# EAGLE library part COM-16273 (library COM-16273)
Joystick, 2 - Axis Analog (Resistive) Output Source: Datasheet <https://cdn.sparkfun.com/assets/f/e/3/8/0/3D16A1N-T-50___________.pdf>
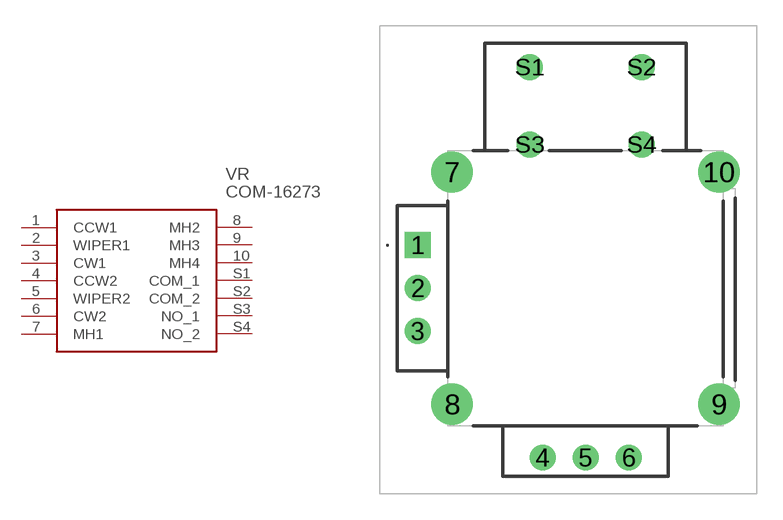
[diagram p0: symbol with the pads of COM16273; footprint COM16273]

Designator prefix VR

## COM-16273 (Description: Joystick, 2 - Axis Analog (Resistive) Output; Height: 19.5mm; Manufacturer_Name: SparkFun; Manufacturer_Part_Number: COM-16273; Mouser_Part_Number: 474-COM-16273; Mouser_Price-Stock: https://www.mouser.co.uk/ProductDetail/SparkFun/COM-16273?qs=DPoM0jnrROWh8LlDtBljIg%3D%3D)  [COM16273]
1  CCW1
2  WIPER1
3  CW1
4  CCW2
5  WIPER2
6  CW2
7  MH1
8  MH2
9  MH3
10  MH4
S1  COM_1
S2  COM_2
S3  NO_1
S4  NO_2

## Footprint COM16273 (pad centres in mm)
COM-16273-7
drill 1 pad 1.5 square: 1 0,0
drill 1 pad 1.5: 2 0,-2.5; 3 0,-5; 4 7.25,-12.35; 5 9.75,-12.35; 6 12.25,-12.35; S1 6.5,10.35; S2 13,10.35; S3 6.5,5.85; S4 13,5.85
drill 1.6 pad 2.4: 7 2,4.25; 8 2,-9.25; 9 17.5,-9.25; 10 17.5,4.25